# Altium footprint library Footprint.PcbLib: 411 footprints (part 22 of 26)
Each footprint in its own frame and in the unit in brackets; x right, y up, seen from the top. Pads: shape width x height; smd on the part's side, far side on the other; paste and mask are expansions set on the pad; w line width, h text height; cw(c..) or ccw(c..) is an arc to the next point about the centre after c.
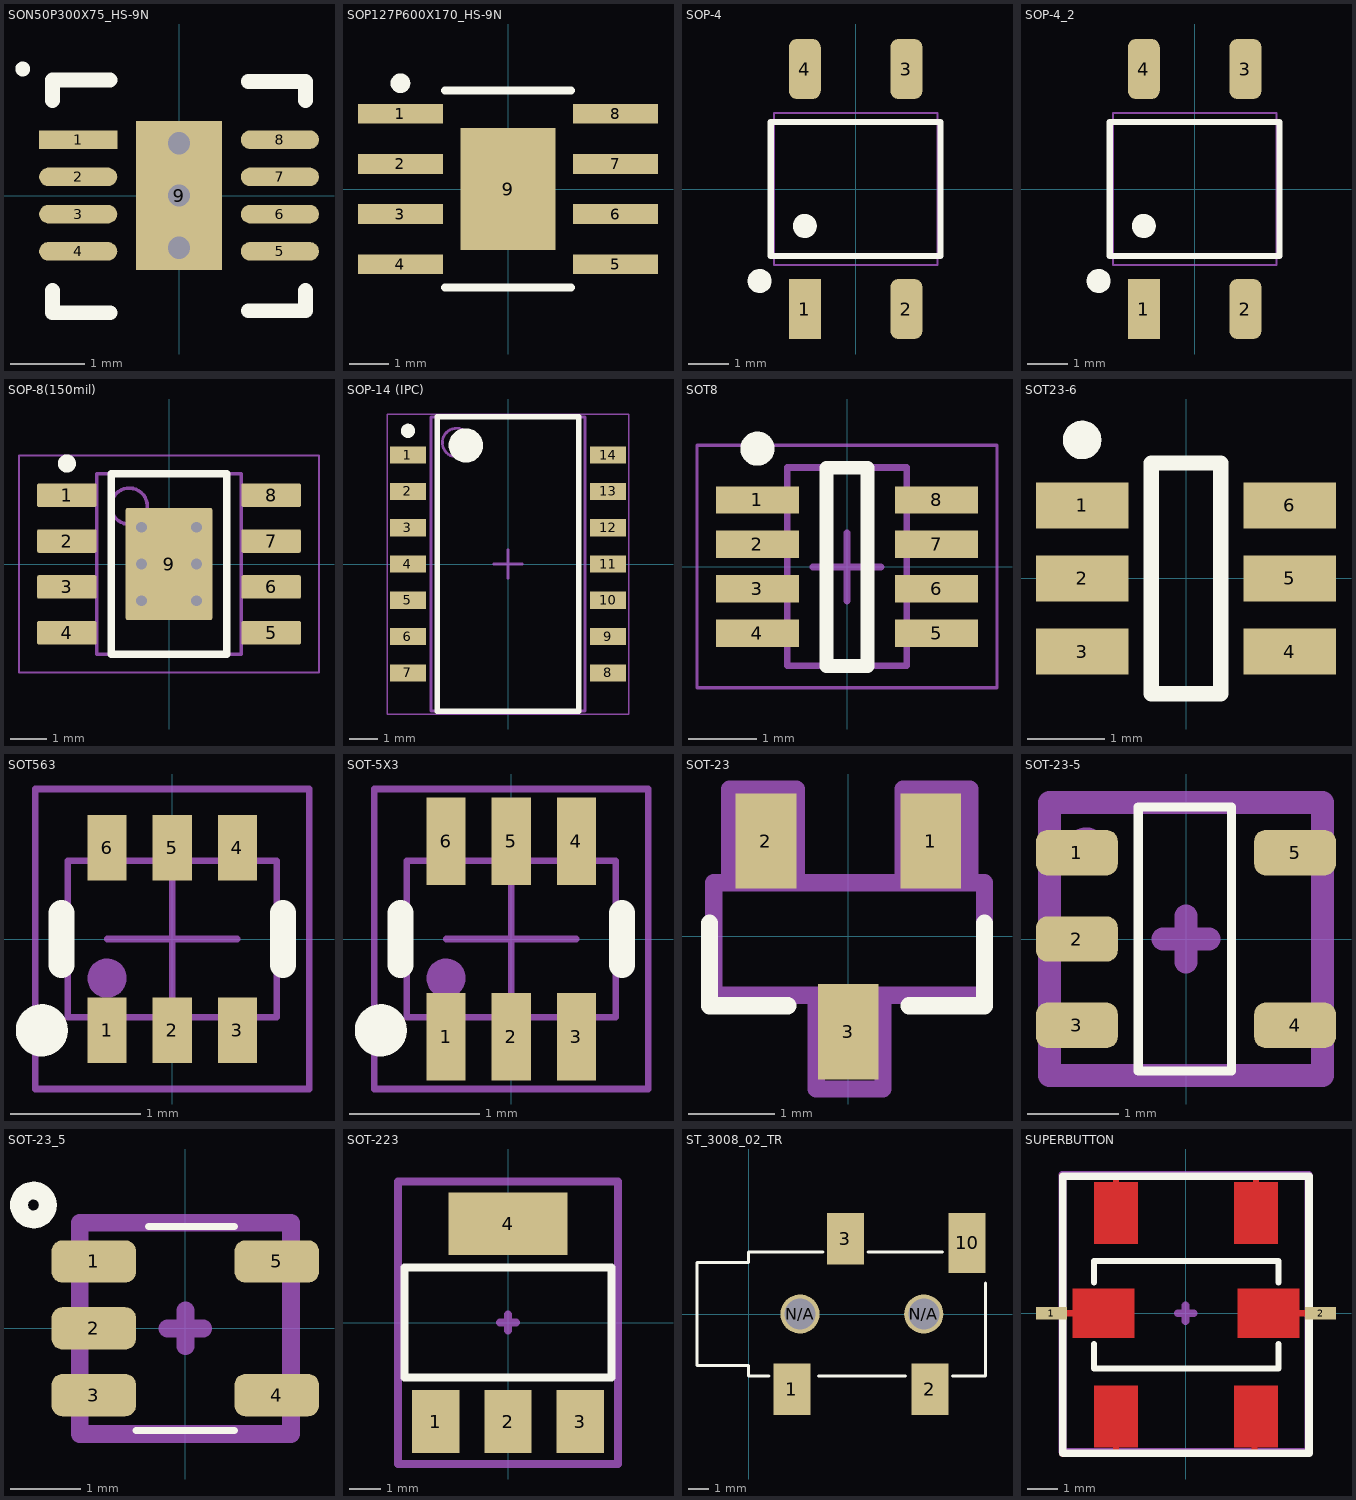
[diagram p21: the footprints below, top view; thin cyan lines are the x and y axes]

## SON50P300X75_HS-9N [mm] "SON, 8-Leads, Body 3,00x3,00mm, Pitch 0,50mm, Thermal Pad 2,00x1,26mm, IPC Medium Density"
height 0.75
pads (9):
  rect 1.05x0.25 smd: 1(-1.355,0.75)
  oval 1.05x0.25 smd: 2(-1.355,0.25) 3(-1.355,-0.25) 4(-1.355,-0.75) 5(1.355,-0.75) 6(1.355,-0.25) 7(1.355,0.25) 8(1.355,0.75)
  rect 1.15x2 smd: 9(0,0)
via 0,0.7 diameter 0.6 hole 0.3
via 0,0 diameter 0.6 hole 0.3
via 0,-0.7 diameter 0.6 hole 0.3
Top Overlay:
  circle w0.1: c-2.1,1.7 r0.05
  lines w0.2: -1.7,-1.275 -1.7,-1.575 -0.93,-1.575 ; -1.7,1.275 -1.7,1.552 -0.93,1.552 ; 0.93,-1.547 1.7,-1.547 1.7,-1.275 ; 0.93,1.534 1.7,1.534 1.7,1.275
Courtyard Top:
  lines w0.1: -0.5,0 0.5,0 ; 0,-0.5 0,0.5
3D body "SON50P300X75_HS-9N.step": height 0.75, standoff 0, extent -1.63,-1.55 1.63,1.55

## SOP127P600X170_HS-9N [mm] "SOP, 8-Leads, Body 4,90x3,90mm, Pitch 1,27mm, Thermal Pad 3,10x2,40mm, IPC Medium Density"
height 1.7
pads (9):
  rect 2.15x0.5 smd: 1(-2.725,1.905) 2(-2.725,0.635) 3(-2.725,-0.635) 4(-2.725,-1.905) 5(2.725,-1.905) 6(2.725,-0.635) 7(2.725,0.635) 8(2.725,1.905)
  rect 2.4x3.1 smd: 9(0,0)
Top Overlay:
  circle w0.25: c-2.725,2.68 r0.125
  lines w0.2: -1.6,-2.5 1.6,-2.5 ; -1.6,2.5 1.6,2.5
Courtyard Top:
  lines w0.1: -0.5,0 0.5,0 ; 0,-0.5 0,0.5
3D body "SOP127P600X170_HS-9N.step": height 1.7, standoff 0, extent -3,-2.5 3,2.5

## SOP-4 [mm]
pads (4):
  rect 0.8x1.5 smd paste+0 mask+0.051: 1(-1.27,-3)
  rrect50% 0.8x1.5 smd paste+0 mask+0.051: 2(1.27,-3) 3(1.27,3) 4(-1.27,3)
Top Overlay:
  circle w0.3: c-2.4,-2.3 r0.15
  circle w0.3: c-1.27,-0.924 r0.15
  lines w0.152: -2.121,-1.676 2.121,-1.676 2.121,1.676 -2.121,1.676 -2.121,-1.676
Mechanical 15:
  lines w0.051: -2.044,-1.905 2.044,-1.905 2.044,1.905 -2.044,1.905 -2.044,-1.905
3D body "User Library-4-SOP.STEP": height 2.1, standoff 0, extent -2.15,-3.4 2.15,3.4

## SOP-4_2 [mm]
pads (4):
  rect 0.8x1.5 smd paste+0 mask+0.051: 1(-1.27,-3)
  rrect50% 0.8x1.5 smd paste+0 mask+0.051: 2(1.27,-3) 3(1.27,3) 4(-1.27,3)
Top Overlay:
  circle w0.3: c-1.27,-0.924 r0.15
  circle w0.3: c-2.4,-2.3 r0.15
  lines w0.152: -2.121,-1.676 -2.121,1.676 2.121,1.676 2.121,-1.676 -2.121,-1.676
Mechanical 15:
  lines w0.051: -2.044,-1.905 -2.044,1.905 2.044,1.905 2.044,-1.905 -2.044,-1.905
3D body "User Library-4-SOP.STEP": height 2.1, standoff 0, extent -2.15,-3.4 2.15,3.4

## SOP-8(150mil) [mm] "SOP, 8-Leads, Body 4x5mm, Pitch 1.27mm, Thermal Pad 2.4x3.1mm, IPC Low Density"
height 1.7
pads (9):
  rrect15% 1.65x0.65 smd: 1(-2.825,1.905) 2(-2.825,0.635) 3(-2.825,-0.635) 4(-2.825,-1.905) 5(2.825,-1.905) 6(2.825,-0.635) 7(2.825,0.635) 8(2.825,1.905)
  rrect4% 2.4x3.1 smd: 9(0,0)
via 0.762,1.016 diameter 0.6 hole 0.3
via 0.762,0 diameter 0.6 hole 0.3
via 0.762,-1.016 diameter 0.6 hole 0.3
via -0.762,-1.016 diameter 0.6 hole 0.3
via -0.762,0 diameter 0.6 hole 0.3
via -0.762,1.016 diameter 0.6 hole 0.3
Top Overlay:
  circle w0.25: c-2.825,2.78 r0.125
  lines w0.2: -1.6,-2.5 1.6,-2.5 1.6,2.5 -1.6,2.5 -1.6,-2.5
Mechanical 1:
  text ".Designator" at -1.524,-0.381 h0.8
Mechanical 13:
  circle w0.1: c-1.1,1.6 r0.5
  lines w0.1: -2,-2.5 2,-2.5 2,2.5 -2,2.5 -2,-2.5
Mechanical 15:
  lines w0.05: -4.15,-3 4.15,-3 4.15,3 -4.15,3 -4.15,-3
  lines w0.1: -0.5,0 0.5,0 -0.5,0 ; 0,-0.5 0,0.5 0,-0.5
3D body "MRA08A.stp": height 1.5, standoff -0.05, extent -2.978,-2.451 2.978,2.451

## SOP-14 (IPC) [mm] "SOP, 14-Leads, Body 10.20x5.30mm, Pitch 1.27mm, IPC High Density"
height 1.9
pads (14):
  rect 1.25x0.6 smd: 1(-3.5,3.81) 2(-3.5,2.54) 3(-3.5,1.27) 4(-3.5,0) 5(-3.5,-1.27) 6(-3.5,-2.54) 7(-3.5,-3.81) 8(3.5,-3.81) 9(3.5,-2.54) 10(3.5,-1.27) 11(3.5,0) 12(3.5,1.27) 13(3.5,2.54) 14(3.5,3.81)
Top Overlay:
  circle w0.25: c-3.5,4.66 r0.125
  circle w0.6: c-1.475,4.15 r0.3
  lines w0.2: -2.475,-5.15 -2.475,5.15 2.475,5.15 2.475,-5.15 -2.475,-5.15
Mechanical 15:
  circle w0.1: c-1.8,4.25 r0.5
  lines w0.05: -4.225,-5.25 -4.225,5.25 4.225,5.25 4.225,-5.25 -4.225,-5.25
  lines w0.1: -0.5,0 0.5,0 ; 0,-0.5 0,0.5 ; -2.7,-5.15 -2.7,5.15 2.7,5.15 2.7,-5.15 -2.7,-5.15
  text ".Designator" at -2.5,5.5 h1.52
3D body "SOP14.step": height 1.9, standoff 0, extent -3.9,-5.15 3.9,5.15

## SOT8 [mm] "SOT23, 8-Leads, Body 2.9x1.75mm, Pitch 0.65mm"
height 1
pads (8):
  rect 1.22x0.4 smd: 1(-1.31,0.975) 2(-1.31,0.325) 3(-1.31,-0.325) 4(-1.31,-0.975) 5(1.31,-0.975) 6(1.31,-0.325) 7(1.31,0.325) 8(1.31,0.975)
Top Overlay:
  circle w0.25: c-1.31,1.726 r0.125
  lines w0.2: -0.3,-1.454 -0.3,1.446 0.3,1.446 0.3,-1.454 -0.3,-1.454
Mechanical 13:
  lines w0.1: -0.875,-1.45 0.875,-1.45 0.875,1.45 -0.875,1.45 -0.875,-1.45
Mechanical 15:
  lines w0.05: -2.195,-1.775 -1.75,-1.775 1.75,-1.775 2.195,-1.775 2.195,-1.55 2.195,1.55 2.195,1.775 1.75,1.775 -1.75,1.775 -2.195,1.775 -2.195,1.55 -2.195,-1.55 -2.195,-1.775
  lines w0.1: -0.501,-0.004 0.499,-0.004 ; -0.001,-0.504 -0.001,0.496
3D body: height 1, standoff 0.01, extent -0.875,-1.45 0.875,1.45

## SOT23-6 [mm] "SOT23, 6-Leads, Body 2,90x2,80mm, Pitch 0,95mm, IPC Medium Density"
height 1.45
pads (6):
  rect 1.2x0.6 smd: 1(-1.35,0.95) 2(-1.35,0) 3(-1.35,-0.95) 4(1.35,-0.95) 5(1.35,0) 6(1.35,0.95)
Top Overlay:
  circle w0.25: c-1.35,1.8 r0.125
  lines w0.2: -0.45,-1.5 0.45,-1.5 0.45,1.5 -0.45,1.5 -0.45,-1.5
3D body "User Library-SOT23-6-2.step": height 1.45, standoff 0, extent -1.4,-1.45 1.4,1.45

## SOT563 [mm] "TVS Diode, package SOT563"
height 0.6
pads (6):
  rect 0.3x0.5 smd: 1(-0.5,-0.7) 2(0,-0.7) 3(0.5,-0.7) 4(0.5,0.7) 5(0,0.7) 6(-0.5,0.7)
Top Overlay:
  circle w0.2: c-1,-0.7 r0.1
  lines w0.2: -0.85,-0.2 -0.85,0.2 ; 0.85,-0.2 0.85,0.2
Mechanical 13:
  circle w0.15: c-0.5,-0.3 r0.075
  lines w0.05: -0.61,-0.6 -0.61,-0.8 -0.39,-0.8 -0.39,-0.6 ; -0.61,0.6 -0.61,0.8 -0.39,0.8 -0.39,0.6 ; -0.11,-0.6 -0.11,-0.8 0.11,-0.8 0.11,-0.6 ; -0.11,0.6 -0.11,0.8 0.11,0.8 0.11,0.6 ; 0.39,-0.6 0.39,-0.8 0.61,-0.8 0.61,-0.6 ; 0.39,0.6 0.39,0.8 0.61,0.8 0.61,0.6 ; -0.8,-0.6 -0.8,0.6 0.8,0.6 0.8,-0.6 -0.8,-0.6
Mechanical 15:
  lines w0.05: -0.5,0 0.5,0 ; 0,-0.5 0,0.5 ; -1.05,-1.15 -1.05,1.15 1.05,1.15 1.05,-1.15 -1.05,-1.15
3D body "STEP-WE-TVS-HS-SOT563-rev1.stp": height 0.54, standoff -0.01, extent -0.8,-0.8 0.8,0.8

## SOT-5X3 [mm] "0.5 pitch"
height 0.6
pads (6):
  rect 0.3x0.67 smd: 1(-0.5,-0.75) 2(0,-0.75) 3(0.5,-0.75) 4(0.5,0.75) 5(0,0.75) 6(-0.5,0.75)
Top Overlay:
  circle w0.2: c-1,-0.7 r0.1
  lines w0.2: -0.85,-0.2 -0.85,0.2 ; 0.85,-0.2 0.85,0.2
Mechanical 13:
  circle w0.15: c-0.5,-0.3 r0.075
  lines w0.05: -0.61,-0.6 -0.61,-0.8 -0.39,-0.8 -0.39,-0.6 ; -0.61,0.6 -0.61,0.8 -0.39,0.8 -0.39,0.6 ; -0.11,-0.6 -0.11,-0.8 0.11,-0.8 0.11,-0.6 ; -0.11,0.6 -0.11,0.8 0.11,0.8 0.11,0.6 ; 0.39,-0.6 0.39,-0.8 0.61,-0.8 0.61,-0.6 ; 0.39,0.6 0.39,0.8 0.61,0.8 0.61,0.6 ; -0.8,-0.6 -0.8,0.6 0.8,0.6 0.8,-0.6 -0.8,-0.6
Mechanical 15:
  lines w0.05: -0.5,0 0.5,0 ; 0,-0.5 0,0.5 ; -1.05,-1.15 -1.05,1.15 1.05,1.15 1.05,-1.15 -1.05,-1.15
3D body "STEP-WE-TVS-HS-SOT563-rev1.stp": height 0.54, standoff -0.01, extent -0.8,-0.8 0.8,0.8

## SOT-23 [mm]
pads (3):
  rect 0.7x1.1 smd: 1(0.95,1.1) 2(-0.95,1.1) 3(0,-1.1)
Top Overlay:
  lines w0.2: -1.6,0.15 -1.6,-0.8 -0.7,-0.8 ; 0.7,-0.8 1.57,-0.8 1.57,0.15
Mechanical 1:
  lines w0.2: -1.37,0.62 -1.37,1.7 -0.6,1.7 -0.6,0.62 ; -0.37,-0.68 -0.37,-1.76 0.4,-1.76 0.4,-0.68 ; 0.63,0.62 0.63,1.7 1.4,1.7 1.4,0.62 ; -1.55,-0.68 -1.55,0.62 1.57,0.62 1.57,-0.68 -1.55,-0.68
3D body "sot23-1.STEP": height 0.98, standoff -0.02, extent -1.46,-1.17 1.46,1.17

## SOT-23-5 [mm]
pads (5):
  rrect50% 0.9x0.5 smd: 1(-1.2,0.95) 2(-1.2,0) 3(-1.2,-0.95) 4(1.2,-0.95) 5(1.2,0.95)
Top Overlay:
  lines w0.1: -0.525,-1.45 0.5,-1.45 0.5,1.45 -0.525,1.45 -0.525,-1.45
Mechanical 15:
  circle w0.254: c-1.1,1 r0.1
  lines w0.254: -0.254,0 0.254,0 ; 0,-0.254 0,0.254 ; -1.5,-1.5 -1.5,1.5 1.5,1.5 1.5,-1.5 -1.5,-1.5
  text ".Designator" at -1.6,1.9 h1.52
3D body "CircuitWorks-SOT-23-5.step": height 1.05, standoff -0.05, extent -1.25,-1.5 1.25,1.5

## SOT-23_5 [mm]
pads (5):
  rrect50% 1.2x0.6 smd: 1(-1.3,0.95) 2(-1.3,0) 3(-1.3,-0.95) 4(1.3,-0.95) 5(1.3,0.95)
Top Overlay:
  circle w0.254: c-2.159,1.753 r0.205
  lines w0.1: -0.7,-1.45 0.7,-1.45 ; -0.525,1.45 0.7,1.45
Mechanical 15:
  circle w0.254: c-1.1,1 r0.1
  lines w0.254: -0.254,0 0.254,0 ; 0,-0.254 0,0.254 ; -1.5,-1.5 1.5,-1.5 1.5,1.5 -1.5,1.5 -1.5,-1.5
  text ".Designator" at -1.6,1.9 h1.52
3D body "CircuitWorks-SOT-23-5.step": height 1.05, standoff -0.05, extent -1.25,-1.5 1.25,1.5

## SOT-223 [mm]
pads (4):
  rect 1.5x2 smd: 1(-2.3,-3.15) 2(0,-3.15) 3(2.3,-3.15)
  rect 3.8x2 smd: 4(0,3.15)
Top Overlay:
  lines w0.254: -3.3,-1.75 3.3,-1.75 3.3,1.75 -3.3,1.75 -3.3,-1.75
Mechanical 15:
  circle w0.254: c-2.3,-3 r0.224
  lines w0.254: -0.254,0 0.254,0 ; 0,-0.254 0,0.254 ; -3.5,-4.5 3.5,-4.5 3.5,4.5 -3.5,4.5 -3.5,-4.5
  text ".Designator" at -2.5,5 h1.52
3D body "CircuitWorks-SOT-223.step": height 1.65, standoff -0.03, extent -3.15,-3.68 3.35,3.28

## ST_3008_02_TR [mm]
pads (6):
  rect 1.8x2.5 smd: 1(2.1,-3.65) 2(8.8,-3.65) 3(4.7,3.65)
  rect 1.8x2.9 smd: 10(10.6,3.45)
  round 1.9 hole 1.5 unplated: N/A(2.5,0) N/A(8.5,0)
Top Overlay:
  lines w0.15: 1,-3 0,-3 0,-2.5 -2.5,-2.5 -2.5,2.5 0,2.5 0,3 3.6,3 ; 3.4,-3 7.6,-3 ; 5.8,3 9.4,3 ; 9.9,-3 11.5,-3 11.5,1.5

## SUPERBUTTON [mm]
pads (2):
  rect 1x0.4 smd: 1(-4.36,0) 2(4.39,0)
Top Layer:
  region: 1.69,0.8 1.69,-0.8 3.69,-0.8 3.69,0.8
  region: 1.59,4.25 1.59,2.25 2.99,2.25 2.99,4.25
  region: 1.59,-2.35 1.59,-4.35 2.99,-4.35 2.99,-2.35
  region: -3.66,0.8 -3.66,-0.8 -1.66,-0.8 -1.66,0.8
  region: -2.96,4.25 -2.96,2.25 -1.56,2.25 -1.56,4.25
  region: -2.96,-2.35 -2.96,-4.35 -1.56,-4.35 -1.56,-2.35
  lines w0.2: -4.01,4.4 -4.01,0 -4.01,-4.55 -2.26,-4.55 -2.26,-4.05 ; -4.01,4.45 -2.26,4.45 -2.26,3.9 ; -3.96,0 -3.46,0 ; 2.24,-4.05 2.24,-4.55 3.99,-4.55 3.99,0 3.54,0 ; 2.29,3.95 2.29,4.45 3.99,4.45 3.99,-0.05
Top Overlay:
  lines w0.2: -2.98,-1.8 -2.98,-1 ; -2.98,1 -2.98,1.7 ; -2.96,-1.8 3.02,-1.8 3.02,-1 ; -2.96,1.7 3.02,1.7 3.02,1
  lines w0.254: -3.99,-4.55 4.01,-4.55 4.01,4.45 -3.99,4.45 -3.99,-4.55
Top Paste:
  region: 1.79,0.7 1.79,-0.7 3.59,-0.7 3.59,0.7
  region: 1.69,4.15 1.69,2.35 2.89,2.35 2.89,4.15
  region: 1.69,-2.45 1.69,-4.25 2.89,-4.25 2.89,-2.45
  region: -3.56,0.7 -3.56,-0.7 -1.76,-0.7 -1.76,0.7
  region: -2.86,4.15 -2.86,2.35 -1.66,2.35 -1.66,4.15
  region: -2.86,-2.45 -2.86,-4.25 -1.66,-4.25 -1.66,-2.45
Top Solder:
  region: 1.79,0.7 1.79,-0.7 3.59,-0.7 3.59,0.7
  region: 1.69,4.15 1.69,2.35 2.89,2.35 2.89,4.15
  region: 1.69,-2.45 1.69,-4.25 2.89,-4.25 2.89,-2.45
  region: -3.56,0.7 -3.56,-0.7 -1.76,-0.7 -1.76,0.7
  region: -2.86,4.15 -2.86,2.35 -1.66,2.35 -1.66,4.15
  region: -2.86,-2.45 -2.86,-4.25 -1.66,-4.25 -1.66,-2.45
Mechanical 15:
  lines w0.254: -0.254,0 0.254,0 ; 0,-0.254 0,0.254 ; -4,-4.5 4,-4.5 4,4.5 -4,4.5 -4,-4.5
  text ".Designator" at -3,5 h1.52